# Altium schematic symbol library AP2151AW-7.SchLib: 1 symbol
Pins are listed as number, name and electrical type; pins without a type are passive.

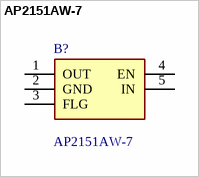
[diagram p0: symbol AP2151AW-7]

## AP2151AW-7
designator B?
Power Switch ICs - Power Distribution 0.5A Sgl-Ch Switch 0.8A 95mOhm 0.6ms; Manufacturer_Name: Diodes Incorporated; Geometry.Height: 1.4mm; TME Electronic Components Part Number: *; TME Electronic Components Price/Stock: *; Manufacturer_Part_Number: AP2151AW-7; Datasheet Link: https://www.diodes.com/assets/Datasheets/AP2151A.pdf
footprint SOT95P285X140-5N
pins: 1 OUT, 2 GND, 3 FLG, 4 EN, 5 IN